# Altium schematic symbol library 1k trimmer tempory.SchLib: 1 symbol
Pins are listed as number, name and electrical type; pins without a type are passive.

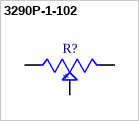
[diagram p0: symbol 3290P-1-102]

## 3290P-1-102
designator R?
Res Wirewound Trimmer 1K Ohm 5% 1W 25(Elec)Turns 1.52mm (9.53 X 10.55 X 3.81mm) Pin Thru-Hole Tube; MF: Bourns Electronics; MP: 3290P1102; SnapEDA_Link: https://www.snapeda.com/parts/3290P1102/Bourns/view-part/?ref=snap; Package: NON-STANDARD Bourns; Value: *; Check_prices: https://www.snapeda.com/parts/3290P1102/Bourns/view-part/?ref=eda
footprint TRIM_3290P-1-102
pins: 1 CCW, 2 WIPER, 3 CW